# Altium schematic symbol library INA219AIDCNR.SchLib: 1 symbol
Pins are listed as number, name and electrical type; pins without a type are passive.

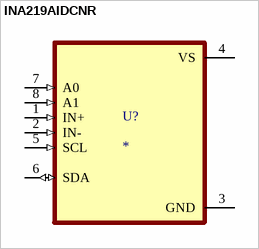
[diagram p0: symbol INA219AIDCNR]

## INA219AIDCNR
designator U?
26-V 12-bit I2C output digital power monitor; MF: Texas Instruments; MP: INA219AIDCNR; SnapEDA_Link: https://www.snapeda.com/parts/INA219AIDCNR/Texas+Instruments/view-part/?ref=snap; Package: SOT-23-8 Texas Instruments; Value: *; Check_prices: https://www.snapeda.com/parts/INA219AIDCNR/Texas+Instruments/view-part/?ref=eda
footprint SOT65P280X145-8N
pins: 1 IN+ (in), 2 IN- (in), 3 GND (power), 4 VS (power), 5 SCL (in), 6 SDA (io), 7 A0 (in), 8 A1 (in)